# Altium schematic symbol library GMT04X7S105K10NT10.SchLib: 1 symbol
Pins are listed as number, name and electrical type; pins without a type are passive.

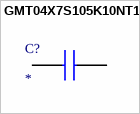
[diagram p0: symbol GMT04X7S105K10NT10]

## GMT04X7S105K10NT10
designator C?
1 µF ±10% 10V Ceramic Capacitor X7S 0402 (1005 Metric); MF: Vishay Vitramon; MP: VJ0402Y104KXXCW1BC; SnapEDA_Link: https://www.snapeda.com/parts/VJ0402Y104KXXCW1BC/Vishay/view-part/?ref=snap; Package: 0402-2 VISHAY; Value: *; Check_prices: https://www.snapeda.com/parts/VJ0402Y104KXXCW1BC/Vishay/view-part/?ref=eda
footprint CAPC1005X55N
pins: 1, 2